# Altium schematic symbol library GJM0335C1H8R2BB01D.SchLib: 1 symbol
Pins are listed as number, name and electrical type; pins without a type are passive.

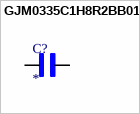
[diagram p0: symbol GJM0335C1H8R2BB01D]

## GJM0335C1H8R2BB01D
designator C?
SMD capacitor C0G(EIA) with capacitance 8.2pF Tol.0.1pF. Rated voltage 50Vdc 125C; MF: Murata Electronics; MP: GJM0335C1H8R2BB01D; SnapEDA_Link: https://www.snapeda.com/parts/GJM0335C1H8R2BB01D/Murata/view-part/?ref=snap; Package: 0603 Taiyo Yuden; Value: *; Check_prices: https://www.snapeda.com/parts/GJM0335C1H8R2BB01D/Murata/view-part/?ref=eda
footprint CAPC0603X33N
pins: 1, 2